# EAGLE library part RT6160AWSC (library astra)
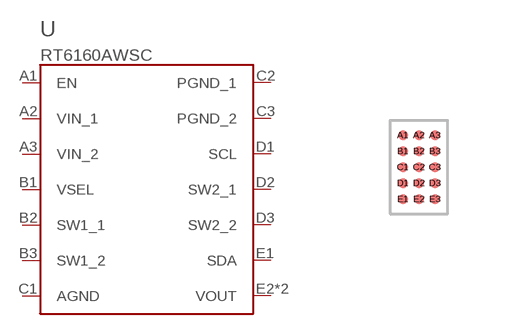
[diagram p4: symbol with the pads of RT_WLCSP15; footprint RT_WLCSP15]

Designator prefix U

## RT6160AWSC  [RT_WLCSP15]
A1  EN  in
A2  VIN_1  pwr
A3  VIN_2  pwr
B1  VSEL  in
B2  SW1_1
B3  SW1_2
C1  AGND  pwr
C2  PGND_1  pwr
C3  PGND_2  pwr
D1  SCL  in
D2  SW2_1
D3  SW2_2
E1  SDA
E2  VOUT  out
E3  VOUT  out

## Footprint RT_WLCSP15 (pad centres in mm)
Richtek RT6160A DS6160A-05 p4 top view and p32 SMD option. 0.25 copper / 0.22 mask within specified ±0.025 mm. ENIG, 0.08 mm local stencil. https://www.richtek.com/assets/product_file/RT6160A/DS6160A-05.pdf
smd 0.25 x 0.25: A1 -0.4,0.8; A2 0,0.8; A3 0.4,0.8; B1 -0.4,0.4; B2 0,0.4; B3 0.4,0.4; C1 -0.4,0; C2 0,0; C3 0.4,0; D1 -0.4,-0.4; D2 0,-0.4; D3 0.4,-0.4; E1 -0.4,-0.8; E2 0,-0.8; E3 0.4,-0.8